# Altium footprint library Verdin Development Board.PcbLib: 154 footprints (part 10 of 10)
Each footprint in its own frame and in the unit in brackets; x right, y up, seen from the top. Pads: shape width x height; smd on the part's side, far side on the other; paste and mask are expansions set on the pad; w line width, h text height; cw(c..) or ccw(c..) is an arc to the next point about the centre after c.
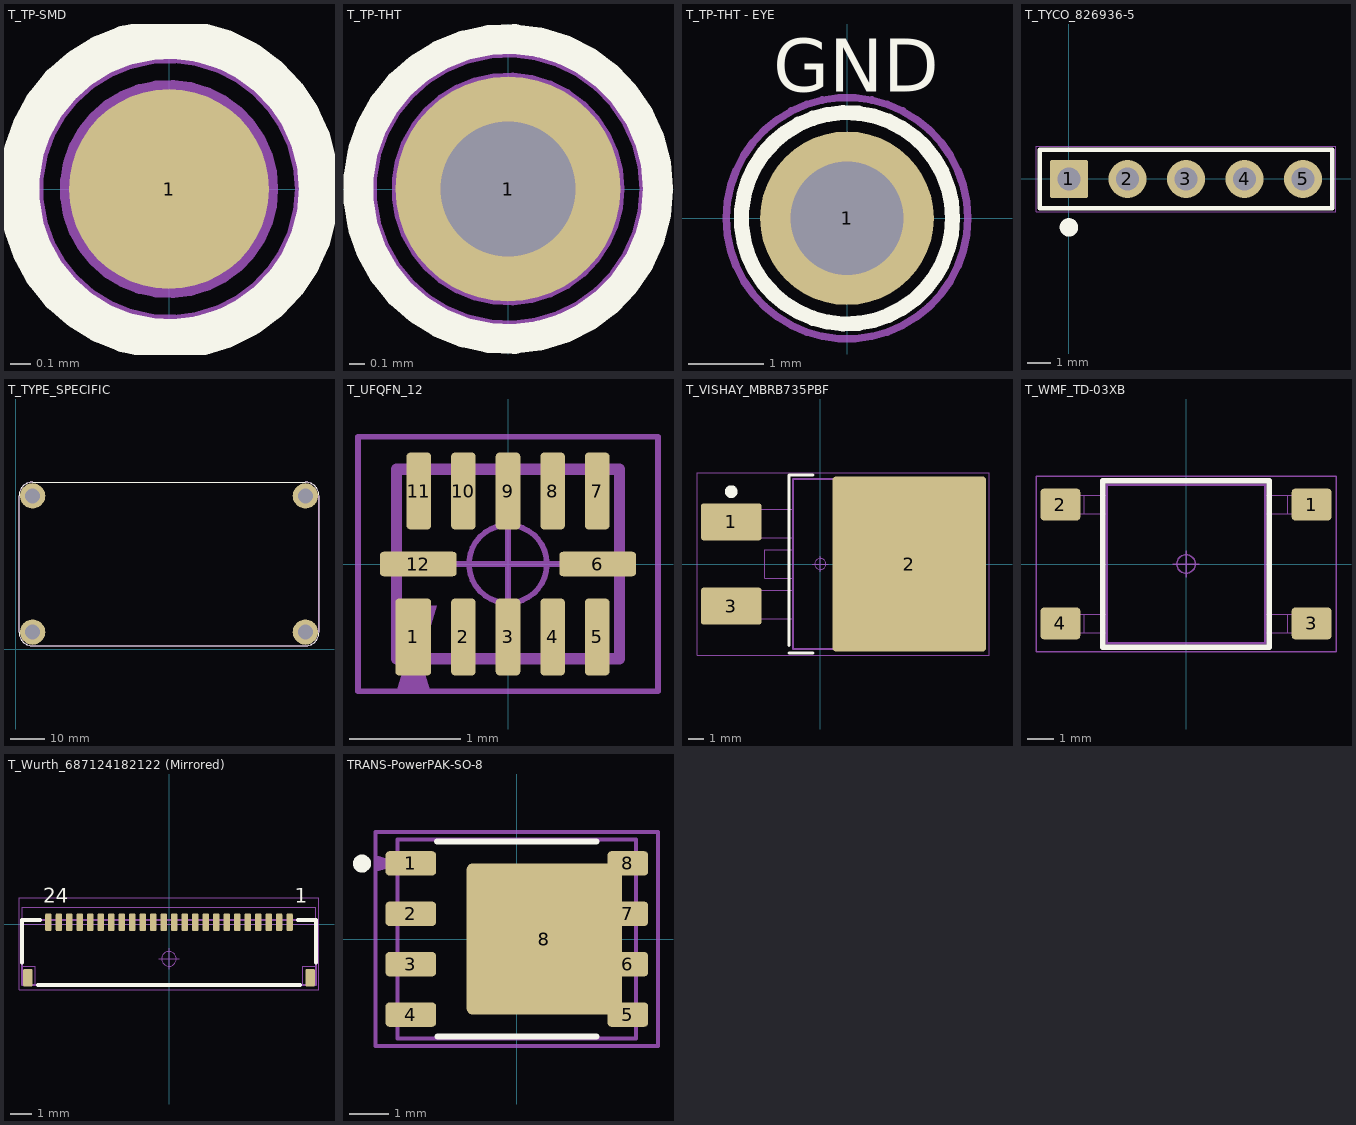
[diagram p9: the footprints below, top view; thin cyan lines are the x and y axes]

## T_TP-SMD [mm]
pads (1):
  round 1 smd paste-0.5: 1(0,0)
Top Overlay:
  circle w0.2: c0,0 r0.75
Top Component Outline:
  circle w0.05: c0,0 r0.654
Top Dimensions:
  circle w0.1: c0,0 r0.496
Top Component Center:
  circle w0.05: c0,0 r0.35
  lines w0.05: -0.5,0 0.5,0 ; 0,-0.5 0,0.5
Top Assembly:
  text ".Designator" at -1.825,0.975 h0.75

## T_TP-THT [mm]
pads (1):
  round 1.5 hole 0.9: 1(0,0)
Top Overlay:
  circle w0.2: c0,0 r1
Top Component Outline:
  circle w0.05: c0,0 r0.901
Top Dimensions:
  circle w0.05: c0,0 r0.752
Top Component Center:
  circle w0.05: c0,0 r0.35
  lines w0.05: -0.5,0 0.5,0 ; 0,-0.5 0,0.5
Top Assembly:
  text ".Designator" at -1.6,1.25 h0.75

## T_TP-THT - EYE [mm]
pads (1):
  round 2.3 hole 1.5: 1(0,0)
Top Overlay:
  circle w0.2: c0,0 r1.4
  text "GND" at -0.975,1.675 h0.7
Top Component Outline:
  circle w0.05: c0,0 r1.6
Top 3D Body:
  circle w0.01: c0,0 r1.587
Top Dimensions:
  circle w0.1: c0,0 r1.6
Top Component Center:
  circle w0.05: c0,0 r0.35
  lines w0.05: -0.5,0 0.5,0 ; 0,-0.5 0,0.5
Top Assembly:
  text ".Designator" at -1.65,1.725 h0.75
3D body "User Library-TEST POINT BLK Keystone 5011.STEP": height 8.14, standoff -3.08, extent -1.587,-1.587 1.588,1.588

## T_TYCO_826936-5 [mm]
pads (5):
  rrect10% 1.65x1.65 hole 1: 1(0,0)
  round 1.65 hole 1: 2(2.54,0) 3(5.08,0) 4(7.62,0) 5(10.16,0)
Top Overlay:
  circle w0.4: c0,-2.1 r0.2
  lines w0.2: -1.27,-1.27 -1.27,1.27 11.43,1.27 11.43,-1.27 -1.27,-1.27
Top Component Outline:
  lines w0.05: -1.43,-1.43 -1.43,1.43 11.59,1.43 11.59,-1.43 -1.43,-1.43
Top 3D Body:
  lines w0.001: 11.43,-1.275 -1.27,-1.275 -1.27,1.27 11.43,1.27 11.43,-1.27
Top Dimensions:
  lines w0.1: 11.425,-1.27 -1.27,-1.27 -1.27,1.27 11.425,1.27 ; 11.43,-1.27 11.43,1.27
Top Component Center:
  circle w0.05: c0,0 r0.35
  lines w0.05: -0.5,0 0.5,0 ; 0,-0.5 0,0.5
Top Assembly:
  text ".Designator" at 3.5,1.725 h0.75
3D body "TSW-105-07-G-S_sc.stp": height 8.38, standoff -2.54, extent -1.397,-1.27 11.43,1.27

## T_TYPE_SPECIFIC [mm]
pads (4):
  round 7.4 / inner round 0 / far side round 0 hole 4.4 unplated: ""(5,5) ""(5,45) ""(85,5) ""(85,45)
Top Overlay:
  lines w0.2: 1,5 ccw(c5,5) 5,1 85,1 ccw(c85,5) 89,5 89,45 ccw(c85,45) 85,49 5,49 ccw(c5,45) 1,45 1,5
Top Paste:
  drawing of 16 lines, arcs and shapes, not listed
Top 3D Body:
  circle w0.01: c85,5 r3
  circle w0.01: c85,45 r3
  circle w0.01: c5,45 r3
  circle w0.01: c5,5 r3
  lines w0.001: 1,5 ccw(c5,5) 5,1 ; 1,45 cw(c5,45) 5,49 ; 85,1 ccw(c85,5) 89,5 ; 85,49 cw(c85,45) 89,45
  lines w0.01: 1,5 1,45 ; 5,1 85,1 ; 5,49 85,49 ; 89,5 89,45
Top Dimensions:
  lines w0.1: 1,5 ccw(c5,5) 5,1 85,1 ccw(c85,5) 89,5 89,45 ccw(c85,45) 85,49 5,49 ccw(c5,45) 1,45 1,5
Top Component Center:
  circle w0.05: c5,5 r0.35
  circle w0.05: c5,45 r0.35
  circle w0.05: c85,45 r0.35
  circle w0.05: c85,5 r0.35
  lines w0.05: 4.5,5 5.5,5 ; 4.5,45 5.5,45 ; 5,4.5 5,5.5 ; 5,44.5 5,45.5 ; 84.5,5 85.5,5 ; 84.5,45 85.5,45 ; 85,4.5 85,5.5 ; 85,44.5 85,45.5
3D body "9774080360R (rev1).stp": height 8.01, standoff -1.39, extent 82,42 88,48
3D body "9774080360R (rev1).stp": height 8.01, standoff -1.39, extent 82,2 88,8
3D body "9774080360R (rev1).stp": height 8.01, standoff -1.39, extent 2,42 8,48
3D body "9774080360R (rev1).stp": height 8.01, standoff -1.39, extent 2,2 8,8

## T_UFQFN_12 [mm]
pads (12):
  rrect20% 0.32x0.69 smd mask+0.05: 1(-0.85,-0.655)
  rrect30% 0.22x0.69 smd mask+0.05: 2(-0.4,-0.655) 3(0,-0.655) 4(0.4,-0.655) 5(0.8,-0.655) 7(0.8,0.655) 8(0.4,0.655) 9(0,0.655) 10(-0.4,0.655) 11(-0.8,0.655)
  rrect30% 0.69x0.22 smd mask+0.05: 6(0.805,0) 12(-0.805,0)
Top Component Outline:
  region: -0.7,-1.143 -0.85,-0.643 -1,-1.143
  lines w0.05: -1.346,-1.143 1.346,-1.143 1.346,1.143 -1.346,1.143 -1.346,-1.143
Top 3D Body:
  lines w0.01: -1,-0.85 1,-0.85 1,0.85 -1,0.85 -1,-0.85
Top Dimensions:
  region: -0.863,-0.375 -0.75,-0.75 -0.638,-0.375
  lines w0.1: -1,-0.85 -1,0.85 1,0.85 1,-0.85 -1,-0.85
Top Component Center:
  circle w0.05: c0,0 r0.35
  lines w0.05: -0.5,0 0.5,0 ; 0,-0.5 0,0.5
Top Assembly:
  text ".Designator" at -1.55,1.425 h0.75
3D body "test-26.step": height 0.55, standoff 0, extent -1.001,-0.851 1.001,0.851

## T_VISHAY_MBRB735PBF [mm]
pads (3):
  rrect15% 3.81x2.32 smd: 1(-5.585,2.64) 3(-5.585,-2.64)
  rrect5% 9.65x11 smd paste-11: 2(5.585,0)
Top Overlay:
  circle w0.4: c-5.585,4.54 r0.2
  lines w0.2: -1.965,-5.585 -0.465,-5.585 ; -1.965,-5.1 -1.965,5.585 -0.465,5.585
Top Paste:
  drawing of 6 lines, arcs and shapes, not listed
Top Component Outline:
  lines w0.05: -7.735,-5.72 -7.735,5.72 10.605,5.72 10.605,-5.72 -7.735,-5.72
Top 3D Body:
  lines w0.001: -1.715,-3.43 -6.295,-3.43 -6.295,-1.65 -1.715,-1.65 ; -1.715,-0.89 -3.495,-0.89 -3.495,0.89 -1.715,0.89 ; -1.715,1.65 -6.295,1.65 -6.295,3.43 -1.715,3.43 ; 7.935,-5.335 7.935,5.335 ; -1.715,-5.335 -1.715,5.335 8.74,5.335 9.585,4.49 9.585,-4.49 8.74,-5.335 -1.715,-5.335
Top Dimensions:
  lines w0.1: 7.935,-5.335 -1.715,-5.335 -1.715,5.335 7.935,5.335 ; 7.935,-5.335 7.935,5.335 ; 7.935,-5.335 8.74,-5.335 9.585,-4.49 9.585,4.49 8.74,5.335 7.935,5.335
Top Component Center:
  circle w0.05: c0,0 r0.35
  lines w0.05: -0.5,0 0.5,0 ; 0,-0.5 0,0.5
Top Assembly:
  text ".Designator" at -0.125,5.925 h0.75
3D body "test-27.step": height 4.83, standoff 0, extent -6.57,-5.325 8.675,5.325

## T_WMF_TD-03XB [mm]
pads (4):
  rrect20% 1.5x1.2 smd: 1(4.75,2.25) 2(-4.75,2.25) 3(4.75,-2.25) 4(-4.75,-2.25)
Top Overlay:
  lines w0.2: -3.15,-3.15 3.15,-3.15 3.15,3.15 -3.15,3.15 -3.15,-3.15
Top Component Outline:
  lines w0.05: -5.675,-3.321 5.675,-3.321 5.675,3.321 -5.675,3.321 -5.675,-3.321
Top 3D Body:
  lines w0.001: -4.05,-2.6 -4.05,-1.9 ; -4.05,1.9 -4.05,2.6 ; -3.85,-2.6 -3.85,-1.9 ; -3.85,1.9 -3.85,2.6 ; -3,-2.6 -5.15,-2.6 -5.15,-1.9 -3,-1.9 ; -3,1.9 -5.15,1.9 -5.15,2.6 -3,2.6 ; 3,-2.6 5.15,-2.6 5.15,-1.9 3,-1.9 ; 3,1.9 5.15,1.9 5.15,2.6 3,2.6 ; 3.85,-2.6 3.85,-1.9 ; 3.85,1.9 3.85,2.6 ; 4.05,-2.6 4.05,-1.9 ; 4.05,1.9 4.05,2.6 ; -3,-3 3,-3 3,3 -3,3 -3,-3
Top Dimensions:
  lines w0.1: -3,-3 3,-3 3,3 -3,3 -3,-3
Top Component Center:
  circle w0.05: c0,0 r0.35
  lines w0.05: -0.5,0 0.5,0 ; 0,-0.5 0,0.5
Top Assembly:
  text ".Designator" at -1.475,3.65 h0.75
3D body: height 3.5, standoff 3.49, extent -3,-3 3,3
3D body: height 7.8, standoff 3.5, extent -1.736,-1.747 1.75,1.747
3D body: height 3.49, standoff 0, extent -3,-3 3,3
3D body: height 3.7, standoff 3.5, extent 1.754,1.751 2.75,2.749
3D body: height 3.7, standoff 3.5, extent -2.746,1.751 -1.75,2.749
3D body: height 3.7, standoff 3.5, extent -2.746,-2.749 -1.75,-1.751
3D body: height 3.7, standoff 3.5, extent 1.754,-2.749 2.75,-1.751
3D body: height 0.2, standoff 0, extent -5.15,1.9 -4.05,2.6
3D body: height 0.2, standoff 0, extent -5.15,-2.6 -4.05,-1.9
3D body: height 0.2, standoff 0, extent 4.05,-2.6 5.15,-1.9
3D body: height 0.2, standoff 0, extent 4.05,1.9 5.15,2.6
3D body: height 1, standoff 0, extent 3.85,1.9 4.05,2.6
3D body: height 1, standoff 0, extent 3.85,-2.6 4.05,-1.9
3D body: height 1, standoff 0, extent -4.05,-2.6 -3.85,-1.9
3D body: height 1, standoff 0, extent -4.05,1.9 -3.85,2.6
3D body: height 1, standoff 0.8, extent -3.85,1.9 -3,2.6
3D body: height 1, standoff 0.8, extent -3.85,-2.6 -3,-1.9
3D body: height 1, standoff 0.8, extent 3,-2.6 3.85,-1.9
3D body: height 1, standoff 0.8, extent 3,1.9 3.85,2.6

## T_Wurth_687124182122 (Mirrored) [mm]
pads (26):
  rrect40% 0.3x0.85 smd: 1(5.75,0.095) 2(5.25,0.095) 3(4.75,0.095) 4(4.25,0.095) 5(3.75,0.095) 6(3.25,0.095) 7(2.75,0.095) 8(2.25,0.095) 9(1.75,0.095) 10(1.25,0.095) 11(0.75,0.095) 12(0.25,0.095) 13(-0.25,0.095) 14(-0.75,0.095) 15(-1.25,0.095) 16(-1.75,0.095) 17(-2.25,0.095) 18(-2.75,0.095) 19(-3.25,0.095) 20(-3.75,0.095) 21(-4.25,0.095) 22(-4.75,0.095) 23(-5.25,0.095) 24(-5.75,0.095)
  rrect30% 0.45x0.85 smd: ""(-6.725,-2.55) ""(6.725,-2.55)
Top Overlay:
  lines w0.2: -7,-1.822 -7,0.2 -6.147,0.2 ; -6.25,-2.9 6.25,-2.9 ; 6.147,0.2 7,0.2 7,-1.822
  text "24" at -6,1.016 h0.7
  text "1" at 6,1.016 h0.7
Top Component Outline:
  lines w0.05: -7.137,-3.124 -7.137,1.27 7.137,1.27 7.137,-3.124 -7.137,-3.124
Top 3D Body:
  lines w0.001: -7,-2.9 7,-2.9 7,0 -7,0
  lines w0.005: -7,-2 -6.375,-2 -6.375,-2.9 ; -7,0 7,0 ; -7,0.2 7,0.2 ; 6.375,-2.9 6.375,-2 7,-2 ; -7,-2.9 7,-2.9 7,0.8 -7,0.8 -7,-2.9
Top Dimensions:
  lines w0.1: -7,-2.896 -7,0.2 7,0.2 7,-2.896 -7,-2.896
Top Component Center:
  circle w0.05: c0,-1.651 r0.35
  lines w0.05: -0.5,-1.651 0.5,-1.651 ; 0,-2.151 0,-1.151
Top Assembly:
  text ".Designator" at -1.825,1.55 h0.75
3D body "STEP-687124182122-rev1.stp": height 0.98, standoff -0.01, extent -7,-2.9 7,0.6

## TRANS-PowerPAK-SO-8 [mm]
pads (9):
  rrect30% 1.27x0.61 smd: 1(-2.67,1.905) 2(-2.67,0.635) 3(-2.67,-0.635) 4(-2.67,-1.905)
  rrect30% 1.02x0.61 smd: 5(2.795,-1.905) 6(2.795,-0.635) 7(2.795,0.635) 8(2.795,1.905)
  rrect8% 3.91x3.81 smd: 8(0.69,0)
Top Overlay:
  circle w0.254: c-3.9,1.9 r0.1
  lines w0.152: -2.005,2.45 2,2.45 ; -2,-2.45 2,-2.45
Top Paste:
  region: -0.65,1.38 2.03,1.38 2.03,-1.38 -0.65,-1.38
Top Component Outline:
  region: -3.55,1.688 -2.843,1.9 -3.55,2.112
  lines w0.1: -3.555,-2.7 -3.555,2.7 3.555,2.7 3.555,-2.7 -3.555,-2.7
Top 3D Body:
  lines w0.01: 2.995,-2.5 -2.995,-2.5 -2.995,2.5 ; -2.995,2.5 2.995,2.5 -2.995,2.5
Top Dimensions:
  region: -2.979,1.682 -2.272,1.894 -2.979,2.106
  lines w0.1: -3,-2.5 -3,2.5 3,2.5 3,-2.5 -3,-2.5
Top Component Center:
  circle w0.05: c0,-0.001 r0.35
  lines w0.05: -0.5,-0.001 0.5,-0.001 ; 0,-0.501 0,0.499
Top Assembly:
  text ".Designator" at -1.875,3 h0.75
3D body "User Library-PowerPAK_SO8_single.STEP": height 1.13, standoff 0.01, extent -3.12,-2.625 3.12,2.625